# Altium footprint library HC-05.PcbLib: 1 footprints
Each footprint in its own frame and in the unit in brackets; x right, y up, seen from the top. Pads: shape width x height; smd on the part's side, far side on the other; paste and mask are expansions set on the pad; w line width, h text height; cw(c..) or ccw(c..) is an arc to the next point about the centre after c.
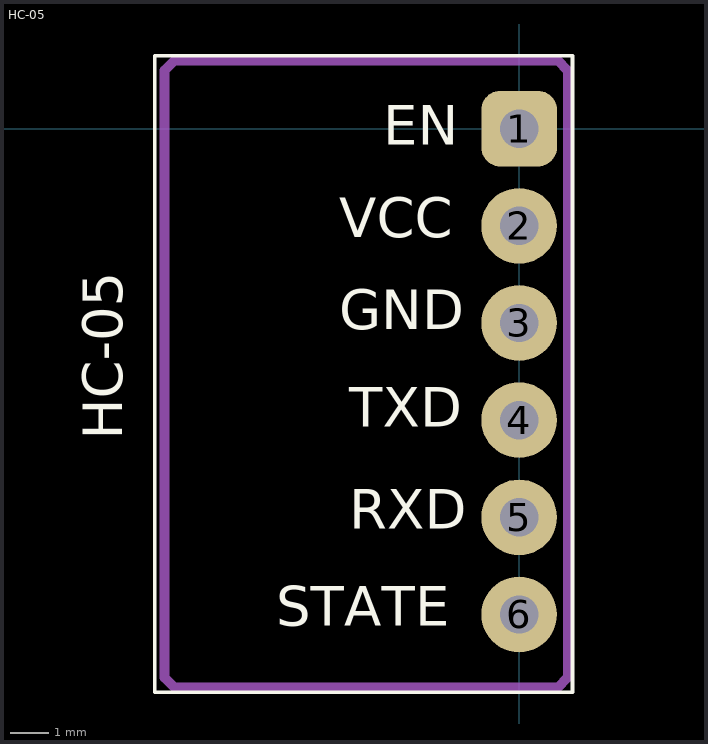
[diagram p0: the footprint, top view; thin cyan lines are the x and y axes]

## HC-05 [mm] "Bluetooth Module HC-05"
pads (6):
  rrect50% 1.98x1.98 hole 1: 1(0,0)
  round 1.98 hole 1: 2(0,-2.54) 3(0,-5.08) 4(0,-7.62) 5(0,-10.16) 6(0,-12.7)
Top Overlay:
  lines w0.1: -9.525,-14.732 1.397,-14.732 1.397,1.905 -9.525,1.905 -9.525,-14.732
  text "EN" at -3.556,-0.762 h1.78
  text "VCC" at -4.699,-3.175 h1.78
  text "GND" at -4.699,-5.588 h1.78
  text "TXD" at -4.445,-8.128 h1.78
  text "RXD" at -4.445,-10.795 h1.78
  text "STATE" at -6.35,-13.335 h1.78
  text "HC-05" at -10.033,-8.128 h1.78
Top Courtyard:
  lines w0.254: -9.271,-14.351 -9.017,-14.605 1.016,-14.605 1.27,-14.351 1.27,1.524 1.016,1.778 -9.017,1.778 -9.271,1.524 -9.271,-14.351
3D body "HC05_Modulo.STEP": height 35.94, standoff -5.58, extent -9.017,-14.225 0.341,1.525